# Altium footprint library LimeMicroAltiumLib.PcbLib: 876 footprints (part 8 of 57)
Each footprint in its own frame and in the unit in brackets; x right, y up, seen from the top. Pads: shape width x height; smd on the part's side, far side on the other; paste and mask are expansions set on the pad; w line width, h text height; cw(c..) or ccw(c..) is an arc to the next point about the centre after c.
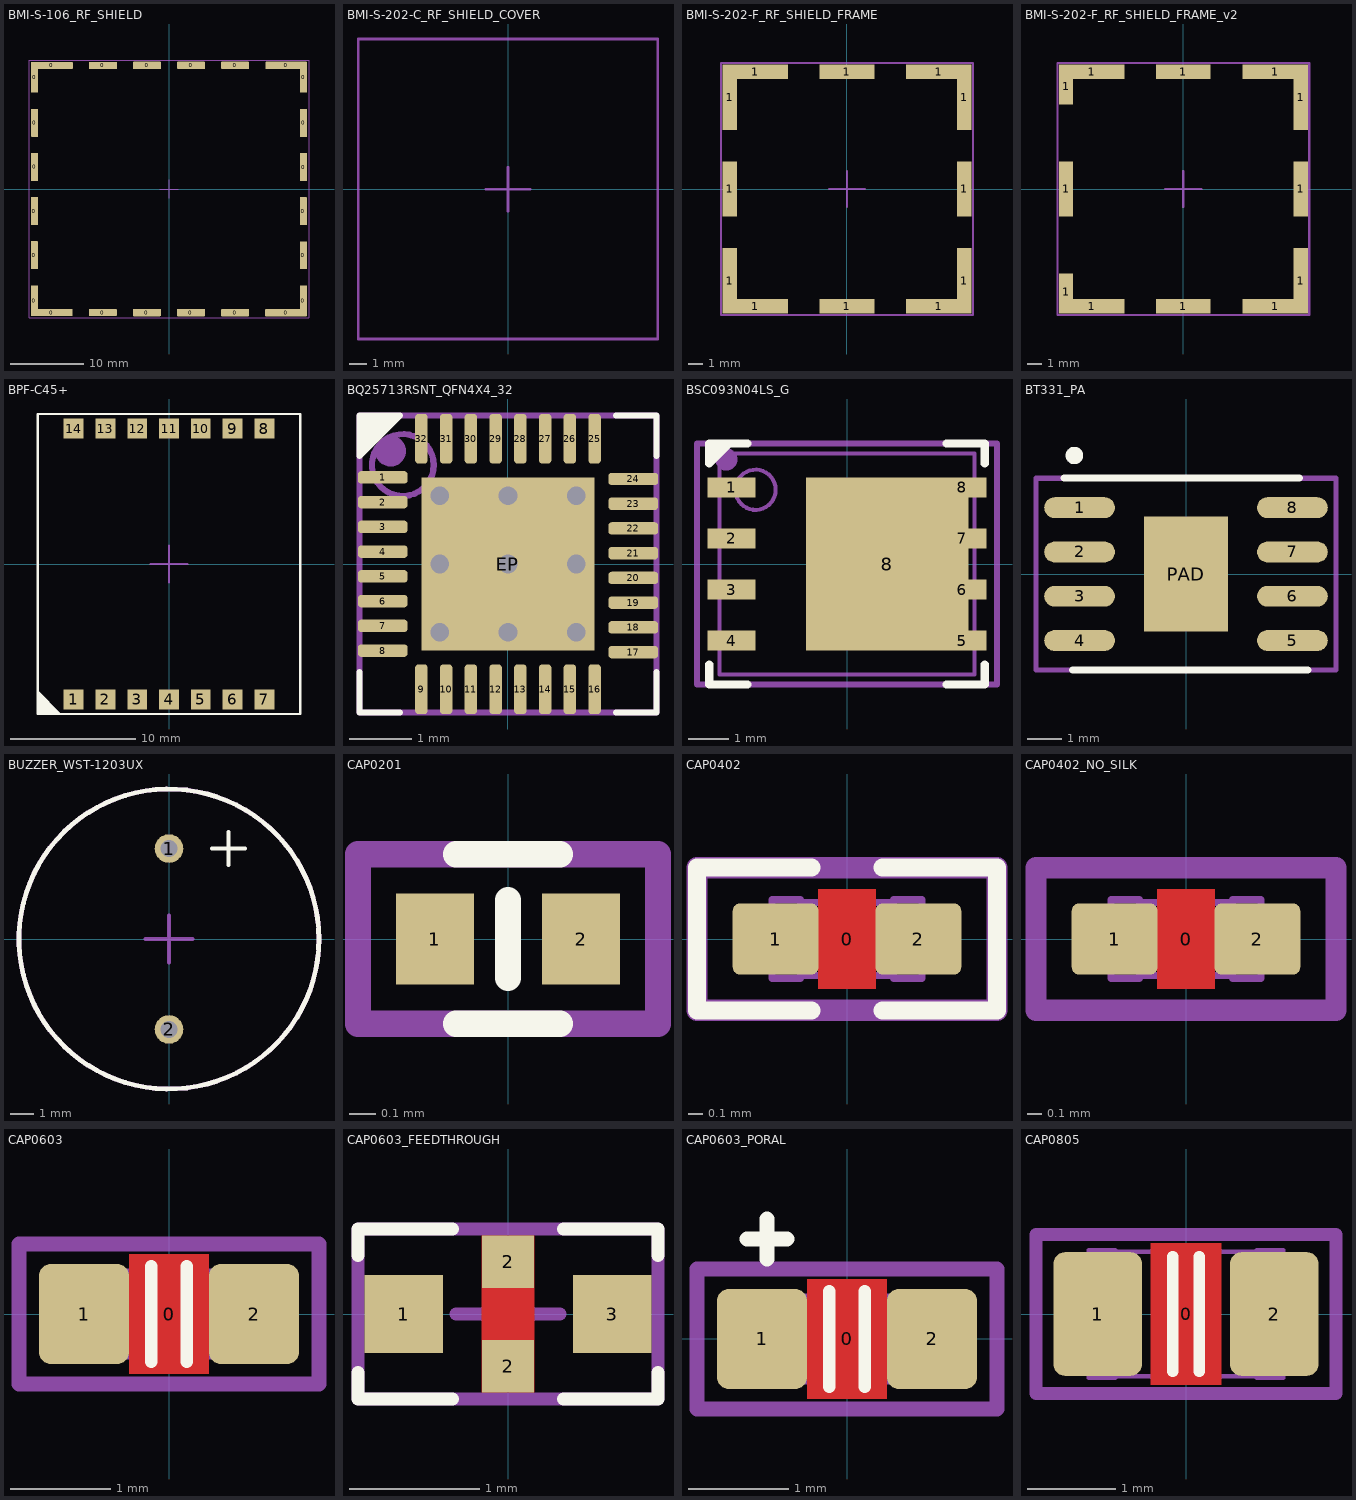
[diagram p7: the footprints below, top view; thin cyan lines are the x and y axes]

## BMI-S-106_RF_SHIELD [mm] "Full footprint"
pads (24):
  rrect20% 1x4.2 smd mask+0.05: 0(-18.295,-15.179) 0(-18.282,15.207) 0(18.282,-15.193) 0(18.295,15.221)
  rrect20% 1x3.8 smd mask+0.05: 0(-18.295,-8.979) 0(-18.291,-2.984) 0(-18.286,3.012) 0(-18.282,9.007) 0(18.282,-8.993) 0(18.286,-2.998) 0(18.291,2.998) 0(18.295,8.993)
  rrect20% 5.7x1 smd mask+0.05: 0(-15.945,-16.779) 0(-15.932,16.807) 0(15.932,-16.793) 0(15.945,16.821)
  rrect20% 3.8x1 smd mask+0.05: 0(-9,-16.784) 0(-8.986,16.812) 0(-3.005,-16.788) 0(-2.991,16.816) 0(2.991,-16.793) 0(3.005,16.821) 0(8.986,-16.798) 0(9,16.825)
Mechanical 15:
  lines w0.15: -1.25,0 0,0 ; 0,-1.25 0,0 ; 0,1.25 0,0 ; 1.25,0 0,0 ; -19,-17.5 19,-17.5 19,17.5 -19,17.5 -19,-17.5
  text ".Designator" at 0,0 h0.55
3D body "bmi-s-106-stp-file.STP": height 5.04, standoff -0.04, extent -18.415,-16.84 18.415,16.84

## BMI-S-202-C_RF_SHIELD_COVER [mm]
Mechanical 15:
  lines w0.15: -1.25,0 0,0 ; 0,-1.25 0,0 ; 0,1.25 0,0 ; 1.25,0 0,0 ; -8.475,-8.475 8.475,-8.475 8.475,8.5 -8.475,8.5 -8.475,-8.475
  text "Shield Cover" at -8.175,-8.125 h0.55
  text ".Designator" at 0,0 h0.55
3D body "bmi-s-202-c-stp-file.STEP": height 4.03, standoff 2.03, extent -8.48,-8.48 8.48,8.48

## BMI-S-202-F_RF_SHIELD_FRAME [mm]
pads (12):
  rect 1x4.55 smd paste-2 mask+0.05: 1(-8.15,-6.375) 1(-8.15,6.375) 1(8.15,-6.375) 1(8.15,6.375)
  rect 1x3.8 smd mask+0.05: 1(-8.15,0) 1(8.15,0)
  rect 4.55x1 smd mask+0.05: 1(-6.375,-8.15) 1(-6.375,8.15) 1(6.375,-8.15) 1(6.375,8.15)
  rect 3.8x1 smd mask+0.05: 1(0,-8.15) 1(0,8.15)
Top Paste:
  region: 8.65,7.45 7.65,7.45 7.65,4.1 8.65,4.1
  rectangle: 7.65,-7.45 8.65,-4.1
  rectangle: -8.65,-7.45 -7.65,-4.1
  rectangle: -8.65,4.1 -7.65,7.45
Mechanical 15:
  lines w0.15: -1.25,0 0,0 ; 0,-1.25 0,0 ; 0,1.25 0,0 ; 1.25,0 0,0 ; -8.75,-8.75 -8.75,8.75 8.75,8.75 8.75,-8.75 -8.75,-8.75
  text "Shield Frame" at -7.875,-8.375 h0.55
  text ".Designator" at 0,0 h0.55
3D body: height 3.6, standoff 3.5, extent -8.05,6.65 8.05,8.25
3D body: height 3.6, standoff 0.5, extent -8.05,8.05 8.05,8.25
3D body: height 3.6, standoff 0.5, extent -8.05,-8.25 8.05,-8.05
3D body: height 3.6, standoff 3.5, extent -8.05,-8.25 8.05,-6.65
3D body: height 3.6, standoff 3.5, extent -3,-3 3,3
3D body: height 3.6, standoff 3.5, extent 3,-0.7 7.15,0.7
3D body: height 0.5, standoff 0, extent 4.4,8.05 8.05,8.25
3D body: height 0.5, standoff 0, extent 4.4,-8.25 8.05,-8.05
3D body: height 3.6, standoff 3.5, extent 6.65,-8.05 8.25,8.05
3D body: height 3.6, standoff 3.5, extent -0.7,3 0.7,7.15
3D body: height 3.6, standoff 3.5, extent -0.7,-7.15 0.7,-3
3D body: height 3.6, standoff 3.5, extent -7.15,-0.7 -3,0.7
3D body: height 0.5, standoff 0, extent -1.5,8.05 1.5,8.25
3D body: height 0.5, standoff 0, extent -1.5,-8.25 1.5,-8.05
3D body: height 0.5, standoff 0, extent -8.05,8.05 -4.4,8.25
3D body: height 0.5, standoff 0, extent -8.05,-8.25 -4.4,-8.05
3D body: height 3.6, standoff 0.5, extent 8.05,-8.05 8.25,8.05
3D body: height 3.6, standoff 3.5, extent -8.25,-8.05 -6.65,8.05
3D body: height 3.6, standoff 0.5, extent -8.25,-8.05 -8.05,8.05
3D body: height 0.5, standoff 0, extent 8.05,4.4 8.25,8.05
3D body: height 0.5, standoff 0, extent -8.25,4.4 -8.05,8.05
3D body: height 0.5, standoff 0, extent 8.05,-1.5 8.25,1.5
3D body: height 0.5, standoff 0, extent 8.05,-8.05 8.25,-4.4
3D body: height 0.5, standoff 0, extent -8.25,-1.5 -8.05,1.5
3D body: height 0.5, standoff 0, extent -8.25,-8.05 -8.05,-4.4

## BMI-S-202-F_RF_SHIELD_FRAME_v2 [mm]
pads (12):
  rect 1x2.5 smd mask+0.05: 1(-8.15,-7.125) 1(-8.15,7.125)
  rect 1x3.8 smd mask+0.05: 1(-8.15,0) 1(8.15,0)
  rect 4.55x1 smd mask+0.05: 1(-6.375,-8.15) 1(-6.375,8.15) 1(6.375,-8.15) 1(6.375,8.15)
  rect 3.8x1 smd mask+0.05: 1(0,-8.15) 1(0,8.15)
  rect 1x4.55 smd mask+0.05: 1(8.15,-6.375) 1(8.15,6.375)
Mechanical 15:
  lines w0.15: -1.25,0 0,0 ; 0,-1.25 0,0 ; 0,1.25 0,0 ; 1.25,0 0,0 ; -8.75,-8.75 8.75,-8.75 8.75,8.75 -8.75,8.75 -8.75,-8.75
  text "Shield Frame" at -7.875,-8.375 h0.55
  text ".Designator" at 0,0 h0.55
3D body: height 0.5, standoff 0, extent -8.25,-8.05 -8.05,-4.4
3D body: height 0.5, standoff 0, extent -8.25,-1.5 -8.05,1.5
3D body: height 0.5, standoff 0, extent 8.05,-8.05 8.25,-4.4
3D body: height 0.5, standoff 0, extent 8.05,-1.5 8.25,1.5
3D body: height 0.5, standoff 0, extent -8.25,4.4 -8.05,8.05
3D body: height 0.5, standoff 0, extent 8.05,4.4 8.25,8.05
3D body: height 3.6, standoff 0.5, extent -8.25,-8.05 -8.05,8.05
3D body: height 3.6, standoff 3.5, extent -8.25,-8.05 -6.65,8.05
3D body: height 3.6, standoff 0.5, extent 8.05,-8.05 8.25,8.05
3D body: height 0.5, standoff 0, extent -8.05,-8.25 -4.4,-8.05
3D body: height 0.5, standoff 0, extent -8.05,8.05 -4.4,8.25
3D body: height 0.5, standoff 0, extent -1.5,-8.25 1.5,-8.05
3D body: height 0.5, standoff 0, extent -1.5,8.05 1.5,8.25
3D body: height 3.6, standoff 3.5, extent -7.15,-0.7 -3,0.7
3D body: height 3.6, standoff 3.5, extent -0.7,-7.15 0.7,-3
3D body: height 3.6, standoff 3.5, extent -0.7,3 0.7,7.15
3D body: height 3.6, standoff 3.5, extent 6.65,-8.05 8.25,8.05
3D body: height 0.5, standoff 0, extent 4.4,-8.25 8.05,-8.05
3D body: height 0.5, standoff 0, extent 4.4,8.05 8.05,8.25
3D body: height 3.6, standoff 3.5, extent 3,-0.7 7.15,0.7
3D body: height 3.6, standoff 3.5, extent -3,-3 3,3
3D body: height 3.6, standoff 3.5, extent -8.05,-8.25 8.05,-6.65
3D body: height 3.6, standoff 0.5, extent -8.05,-8.25 8.05,-8.05
3D body: height 3.6, standoff 0.5, extent -8.05,8.05 8.05,8.25
3D body: height 3.6, standoff 3.5, extent -8.05,6.65 8.05,8.25

## BPF-C45+ [mm]
height 6.35
pads (14):
  rect 1.6x1.6 smd mask+0.05: 1(-7.62,-10.83) 2(-5.08,-10.83) 3(-2.54,-10.83) 4(0,-10.83) 5(2.54,-10.83) 6(5.08,-10.83) 7(7.62,-10.83) 8(7.62,10.83) 9(5.08,10.83) 10(2.54,10.83) 11(0,10.83) 12(-2.54,10.83) 13(-5.08,10.83) 14(-7.62,10.83)
Top Overlay:
  region: -10.5,-10.1 -10.5,-12 -8.6,-12
  lines w0.2: -10.5,-12 10.5,-12 10.5,12 -10.5,12 -10.5,-12
Mechanical 15:
  circle w0.3: c-7.6,-10.8 r0.141
  lines w0.15: -1.5,0 0,0 ; 0,-1.5 0,0 ; 0,1.5 0,0 ; 1.5,0 0,0 ; -10.5,-12 -10.5,12 10.5,12 10.5,-12 -10.5,-12
  text ".Designator" at 0,0 h0.55
3D body: height 6.35, standoff 0, extent -10.15,-11.05 10.15,11.05

## BQ25713RSNT_QFN4X4_32 [mm] "QFN, 32-Leads, Body 4.15x4.15mm, Pitch 0.4mm, IPC High Density"
height 1
pads (33):
  rrect50% 0.8x0.2 smd mask+0.05: 1(-2.025,1.4) 2(-2.025,1) 3(-2.025,0.6) 4(-2.025,0.2) 5(-2.025,-0.2) 6(-2.025,-0.6) 7(-2.025,-1) 8(-2.025,-1.4) 17(2.025,-1.425) 18(2.025,-1.025) 19(2.025,-0.625) 20(2.025,-0.225) 21(2.025,0.175) 22(2.025,0.575) 23(2.025,0.975) 24(2.025,1.375)
  rrect50% 0.2x0.8 smd mask+0.05: 9(-1.4,-2.025) 10(-1,-2.025) 11(-0.6,-2.025) 12(-0.2,-2.025) 13(0.2,-2.025) 14(0.6,-2.025) 15(1,-2.025) 16(1.4,-2.025) 25(1.4,2.025) 26(1,2.025) 27(0.6,2.025) 28(0.2,2.025) 29(-0.2,2.025) 30(-0.6,2.025) 31(-1,2.025) 32(-1.4,2.025)
  rect 2.8x2.8 smd mask+0.05: EP(0,0)
via -1.1,1.1 diameter 0.6 hole 0.3
via 0,1.1 diameter 0.6 hole 0.3
via 1.1,1.1 diameter 0.6 hole 0.3
via -1.1,0 diameter 0.6 hole 0.3
via 0,0 diameter 0.6 hole 0.3
via 1.1,0 diameter 0.6 hole 0.3
via -1.1,-1.1 diameter 0.6 hole 0.3
via 0,-1.1 diameter 0.6 hole 0.3
via 1.1,-1.1 diameter 0.6 hole 0.3
Top Overlay:
  region: -2.4,1.75 -2.4,2.4 -1.75,2.4
  lines w0.1: -2.4,-1.75 -2.4,-2.4 -1.75,-2.4 ; 1.75,-2.4 2.4,-2.4 2.4,-1.75 ; 1.75,2.4 2.4,2.4 2.4,1.75 ; -2.4,1.75 -2.4,2.4 -1.75,2.4 -2.4,1.75
Mechanical 13:
  circle w0.1: c-1.7,1.6 r0.5
  lines w0.1: -2.4,-2.4 -2.4,2.4 2.4,2.4 2.4,-2.4 -2.4,-2.4
Mechanical 15:
  circle w0.25: c-1.9,1.825 r0.125
  lines w0.1: -0.5,0 0.5,0 ; 0,-0.5 0,0.5 ; -2.4,-2.4 -2.4,2.4 2.4,2.4 2.4,-2.4 -2.4,-2.4
  text ".Designator" at 0,0 h0.55
3D body "User Library-IP101.step": height 0.91, standoff 0, extent -2.02,-2.01 2,2.01

## BSC093N04LS_G [mm] "SON, 8-Leads, Body 5,32x6,15mm, Pitch 1,27mm, Thermal Pad 3,60x4,05mm, IPC Medium Density"
height 1.1
pads (9):
  rect 1.2x0.5 smd: 1(-2.87,1.905) 2(-2.87,0.635) 3(-2.87,-0.635) 4(-2.87,-1.905) 5(2.87,-1.905) 6(2.87,-0.635) 7(2.87,0.635) 8(2.87,1.905)
  rect 4.05x4.3 smd paste-2.025: 8(1,0)
Top Overlay:
  region: -3.425,2.5 -3.425,2.995 -3.416,2.986 -2.939,2.986
  lines w0.2: -3.425,-2.5 -3.425,-2.995 -2.47,-2.995 ; -2.939,2.986 -3.425,2.5 -3.425,2.995 -2.47,2.995 ; 2.47,-2.995 3.425,-2.995 3.425,-2.5 ; 2.47,2.995 3.425,2.995 3.425,2.5
Mechanical 13:
  circle w0.1: c-2.275,1.845 r0.5
  lines w0.1: -3.175,-2.745 -3.175,2.745 3.175,2.745 3.175,-2.745 -3.175,-2.745
Mechanical 15:
  circle w0.35: c-3,2.6 r0.1
  lines w0.15: -0.5,0 0.5,0 ; 0,-0.5 0,0.5 ; -3.73,-3 -3.73,3 3.73,3 3.73,-3 -3.73,-3
  text ".Designator" at 0,0 h0.55
3D body "User Library-TDSON-8-1.step": height 1, standoff 0, extent -3.075,-2.675 3.075,2.675

## BT331_PA [mm] "Berex BT331 RF PA"
pads (9):
  oval 2.03x0.6 smd mask+0.05: 1(-3.05,1.905) 2(-3.05,0.635) 3(-3.05,-0.635) 4(-3.05,-1.905) 5(3.05,-1.905) 6(3.05,-0.635) 7(3.05,0.635) 8(3.05,1.905)
  rect 2.41x3.3 smd mask+0.05: PAD(0,0)
Top Overlay:
  circle w0.3: c-3.2,3.4 r0.1
  lines w0.2: -3.5,2.75 3.25,2.75 ; -3.25,-2.75 3.5,-2.75
Mechanical 15:
  circle w0.3: c-3.15,1.925 r0.103
  lines w0.15: -0.5,0 0.5,0 ; 0,-0.5 0,0.5 ; -4.3,-2.75 -4.3,2.75 4.3,2.75 4.3,-2.75 -4.3,-2.75
  text ".Designator" at 0,0 h0.55
3D body "SOIC-8.STEP": height 1.75, standoff 0, extent -3,-2.45 3,2.45

## BUZZER_WST-1203UX [mm]
pads (2):
  round 1.2 hole 0.7 mask+0.05: 1(0,3.8) 2(0,-3.8)
Top Overlay:
  circle w0.2: c0,0 r6.3
  lines w0.15: 1.8,3.8 3.2,3.8 ; 2.5,3.1 2.5,4.5
Mechanical 15:
  circle w0.2: c0,0 r6.301
  lines w0.15: -1,0 0,0 ; 0,-1 0,0 ; 0,1 0,0 ; 1,0 0,0
  text "positive (longer pin)" at -5.3,2.4 h0.55
  text ".Designator" at 0,0 h0.55
3D body "User Library-WST-1203UX.step": height 9.65, standoff -4.5, extent -6,-6.027 6,9.427

## CAP0201 [mm]
pads (2):
  rect 0.3x0.35 smd mask+0.05: 1(-0.28,0) 2(0.28,0)
Top Overlay:
  lines w0.1: -0.2,-0.325 0.2,-0.325 ; -0.2,0.325 0.2,0.325 ; 0,-0.15 0,0.15
Mechanical 15:
  circle w0.05: c0,0 r0.025
  lines w0.1: -0.575,-0.325 -0.575,0.325 0.575,0.325 0.575,-0.325 -0.575,-0.325
  text ".Designator" at 0,0 h0.55
3D body: height 0.25, standoff 0, extent 0.17,-0.15 0.3,0.15
3D body: height 0.25, standoff 0, extent -0.3,-0.15 -0.17,0.15
3D body: height 0.25, standoff 0, extent -0.17,-0.15 0.17,0.15

## CAP0402 [mm] "Chip Capacitor, Body 1.0x0.5mm, 0402, IPC Medium Density"
height 0.55
pads (3):
  round 0.2 on Mech15: 0(0,0)
  rrect20% 0.6x0.5 smd: 1(-0.5,0) 2(0.5,0)
Top Layer:
  pour cut-out: -0.2,0.35 0.2,0.35 0.2,-0.35 -0.2,-0.35
Top Overlay:
  lines w0.127: -0.25,-0.5 -1.05,-0.5 -1.05,0.5 -0.25,0.5 ; 0.25,-0.5 1.05,-0.5 1.05,0.5 0.25,0.5
Mechanical 13:
  lines w0.05: -0.325,-0.255 0.325,-0.255 ; -0.325,0.255 0.325,0.255 ; -0.525,-0.275 -0.525,0.275 -0.325,0.275 -0.325,-0.275 -0.525,-0.275 ; 0.325,-0.275 0.525,-0.275 0.525,0.275 0.325,0.275 0.325,-0.275
Mechanical 15:
  lines w0.15: -1.05,-0.5 -1.05,0.5 1.05,0.5 1.05,-0.5 -1.05,-0.5
  text ".Designator" at 0,0 h0.55
3D body "CAP 0402 (1005 metric).STEP": height 0.55, standoff 0, extent -0.525,-0.275 0.525,0.275

## CAP0402_NO_SILK [mm] "Chip Capacitor, Body 1.0x0.5mm, 0402, IPC Medium Density"
height 0.55
pads (3):
  round 0.2 on Mech15: 0(0,0)
  rrect20% 0.6x0.5 smd: 1(-0.5,0) 2(0.5,0)
Top Layer:
  pour cut-out: -0.2,0.35 0.2,0.35 0.2,-0.35 -0.2,-0.35
Mechanical 13:
  lines w0.05: -0.325,-0.255 0.325,-0.255 ; -0.325,0.255 0.325,0.255 ; -0.525,-0.275 -0.525,0.275 -0.325,0.275 -0.325,-0.275 -0.525,-0.275 ; 0.325,-0.275 0.525,-0.275 0.525,0.275 0.325,0.275 0.325,-0.275
Mechanical 15:
  lines w0.15: -1.05,-0.5 -1.05,0.5 1.05,0.5 1.05,-0.5 -1.05,-0.5
  text ".Designator" at 0,0 h0.55
3D body "CAP 0402 (1005 metric).STEP": height 0.55, standoff 0, extent -0.525,-0.275 0.525,0.275

## CAP0603 [mm] "Chip Capacitor, Body 1.6x0.8mm, 0603, IPC Medium Density"
height 0.8
pads (3):
  round 0.254 on Mech15: 0(0,0)
  rrect25% 0.9x1 smd: 1(-0.85,0) 2(0.85,0)
Top Layer:
  pour cut-out: -0.4,0.6 0.4,0.6 0.4,-0.6 -0.4,-0.6
Top Overlay:
  lines w0.127: -0.178,-0.476 -0.178,0.476 ; 0.178,-0.476 0.178,0.476
Mechanical 13:
  lines w0.05: -0.55,-0.43 0.55,-0.43 ; -0.55,0.43 0.55,0.43 ; -0.85,-0.45 -0.85,0.45 -0.55,0.45 -0.55,-0.45 -0.85,-0.45 ; 0.55,-0.45 0.55,0.45 0.85,0.45 0.85,-0.45 0.55,-0.45
Mechanical 15:
  lines w0.15: -1.5,-0.7 -1.5,0.7 1.5,0.7 1.5,-0.7 -1.5,-0.7
  text ".Designator" at 0,0 h0.55
3D body "CAP_0603.STEP": height 0.89, standoff -0.01, extent -0.85,-0.45 0.85,0.45

## CAP0603_FEEDTHROUGH [mm]
pads (4):
  rect 0.6x0.6 smd mask+0.05: 1(-0.8,0) 3(0.8,0)
  rect 0.4x0.4 smd mask+0.05: 2(0,-0.4) 2(0,0.4)
Top Layer:
  region: -0.375,-0.4
  region: -0.2,-0.6 -0.2,0.6 0.2,0.6 0.2,-0.6
  region: 0.375,0.425
Top Overlay:
  lines w0.1: -1.15,-0.45 -1.15,-0.65 -0.425,-0.65 ; -1.15,0.45 -1.15,0.65 -0.425,0.65 ; 0.425,-0.65 1.15,-0.65 1.15,-0.45 ; 0.425,0.65 1.15,0.65 1.15,0.45
Mechanical 15:
  lines w0.1: -0.4,0 0,0 ; 0,-0.4 0,0 ; 0,0.4 0,0 ; 0.4,0 0,0 ; -1.15,-0.65 -1.15,0.65 1.15,0.65 1.15,-0.65 -1.15,-0.65
  text ".Designator" at 0,0 h0.55
3D body "User Library-Murata_NFM18PC_2Amp.STEP": height 0.6, standoff 0, extent -0.8,-0.4 0.8,0.4

## CAP0603_PORAL [mm] "Chip Capacitor, Body 1.6x0.8mm, 0603, IPC Medium Density"
height 0.8
pads (3):
  round 0.254 on Mech15: 0(0,0)
  rrect25% 0.9x1 smd: 1(-0.85,0) 2(0.85,0)
Top Layer:
  pour cut-out: -0.4,0.6 0.4,0.6 0.4,-0.6 -0.4,-0.6
Top Overlay:
  lines w0.127: -0.178,-0.476 -0.178,0.476 ; 0.178,-0.476 0.178,0.476
  lines w0.15: -1,1 -0.6,1 ; -0.8,0.8 -0.8,1.2
Mechanical 13:
  lines w0.05: -0.55,-0.43 0.55,-0.43 ; -0.55,0.43 0.55,0.43 ; -0.85,-0.45 -0.85,0.45 -0.55,0.45 -0.55,-0.45 -0.85,-0.45 ; 0.55,-0.45 0.55,0.45 0.85,0.45 0.85,-0.45 0.55,-0.45
Mechanical 15:
  lines w0.15: -1.1,0 -0.7,0 ; -0.9,-0.2 -0.9,0.2 ; -1.5,-0.7 -1.5,0.7 1.5,0.7 1.5,-0.7 -1.5,-0.7
  text "Anode" at -1.4,-0.6 h0.3
  text ".Designator" at 0,0 h0.55
3D body "CAP_0603.STEP": height 0.89, standoff -0.01, extent -0.85,-0.45 0.85,0.45

## CAP0805 [mm] "Chip Capacitor, Body 2.0x1.2mm, 0805, IPC Medium Density"
height 1.2
pads (3):
  round 0.254 on Mech15: 0(0,0)
  rrect25% 1x1.4 smd: 1(-1,0) 2(1,0)
Top Layer:
  pour cut-out: -0.4,0.8 0.4,0.8 0.4,-0.8 -0.4,-0.8
Top Overlay:
  lines w0.127: -0.15,-0.651 -0.15,0.651 ; 0.15,-0.651 0.15,0.651
Mechanical 13:
  lines w0.05: -0.8,-0.705 0.8,-0.705 ; -0.8,0.705 0.8,0.705 ; -1.1,-0.725 -1.1,0.725 -0.8,0.725 -0.8,-0.725 -1.1,-0.725 ; 0.8,-0.725 1.1,-0.725 1.1,0.725 0.8,0.725 0.8,-0.725
Mechanical 15:
  lines w0.15: -1.7,-0.9 -1.7,0.9 1.7,0.9 1.7,-0.9 -1.7,-0.9
  text ".Designator" at 0,0 h0.55
3D body "CAP_0805.STEP": height 1.34, standoff -0.01, extent -1.1,-0.725 1.1,0.725